# Altium footprint library Robert_.PcbLib: 95 footprints (part 5 of 6)
Each footprint in its own frame and in the unit in brackets; x right, y up, seen from the top. Pads: shape width x height; smd on the part's side, far side on the other; paste and mask are expansions set on the pad; w line width, h text height; cw(c..) or ccw(c..) is an arc to the next point about the centre after c.
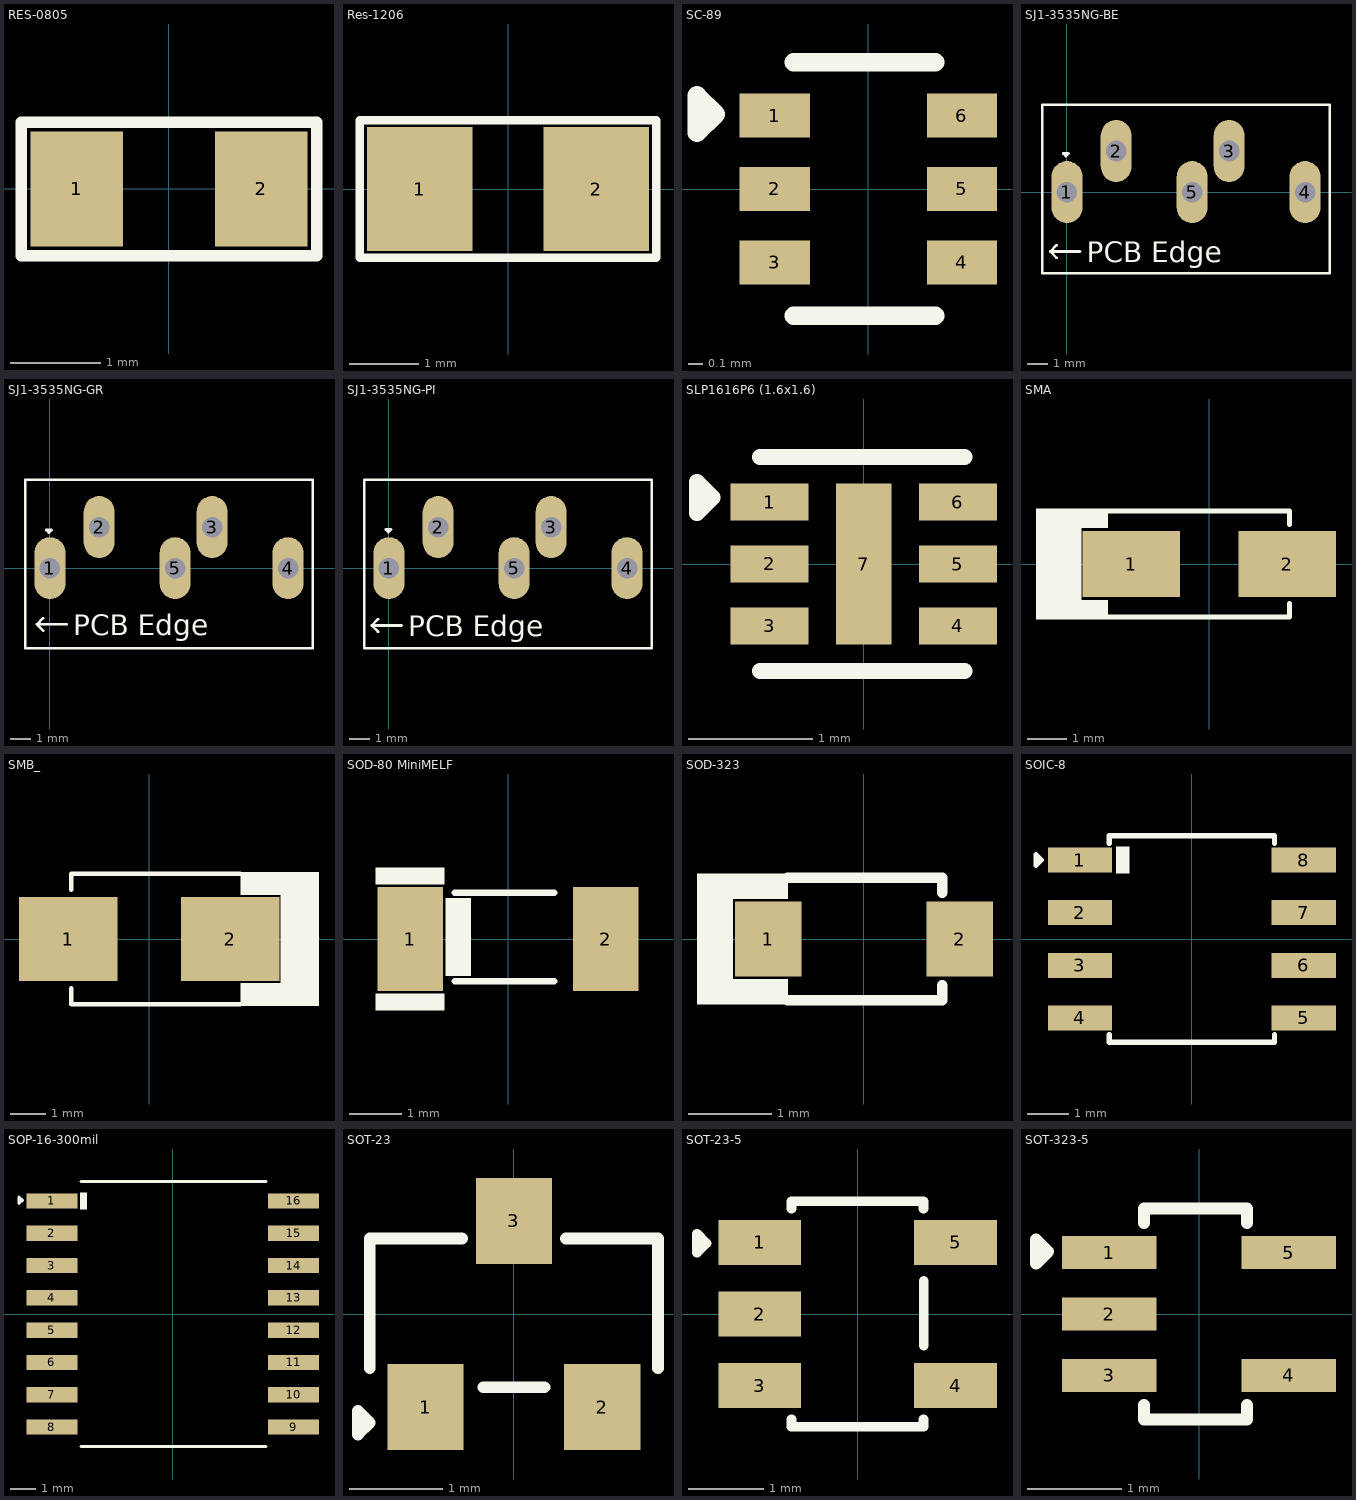
[diagram p4: the footprints below, top view; thin cyan lines are the x and y axes]

## RES-0805 [mil] "SMD 0805"
pads (2):
  rect 40x50 smd: 1(-40,0) 2(40,0)
Top Overlay:
  lines w5: -64,-29 -64,29 64,29 64,-29 -64,-29
3D body "User Library-CR2012-0805.STEP": height 23.62, standoff 0, extent -39.34,-24.75 39.4,24.46

## Res-1206 [mil]
pads (2):
  rect 60x70 smd: 1(-50,0) 2(50,0)
Top Overlay:
  lines w5: -84,-39 84,-39 84,39 -84,39 -84,-39
3D body "User Library-CR3216-1206.step": height 23.62, standoff 0, extent -62.99,-31.5 62.99,31.5

## SC-89 [mm]
pads (6):
  rect 0.478x0.3 smd: 1(-0.638,0.5) 2(-0.638,0) 3(-0.638,-0.5) 4(0.638,-0.5) 5(0.638,0) 6(0.638,0.5)
Top Overlay:
  lines w0.127: -0.508,-0.864 0.457,-0.864 ; -0.508,0.864 0.457,0.864 ; -1.168,0.383 -1.168,0.637 -1.041,0.51 -1.168,0.383
3D body "TMP112AIDRLR--3DModel-STEP-56544.STEP": height 0.6, standoff 0, extent -0.8,-0.8 0.8,0.8

## SJ1-3535NG-BE [mm]
pads (5):
  oval 1.508x3.016 hole 1 square: 1(0,0) 2(2.4,2) 3(7.9,2) 4(11.6,0) 5(6.1,0)
Top Overlay:
  lines w0.127: -0.508,-3.2 -0.813,-2.896 ; -0.508,-2.591 -0.813,-2.896 ; 0.635,-2.896 -0.813,-2.896 ; -1.2,-3.951 12.8,-3.951 12.8,4.249 -1.2,4.249 -1.2,-3.951 ; -0.178,1.88 -0.051,1.753 0.076,1.88 -0.178,1.88
  text "PCB Edge" at 0.954,-3.418 h1
3D body "step_temp.STEP": height 12.3, standoff -3.3, extent -5.2,-4 12.8,4.2

## SJ1-3535NG-GR [mm]
pads (5):
  oval 1.508x3.016 hole 1 square: 1(0,0) 2(2.4,2) 3(7.9,2) 4(11.6,0) 5(6.1,0)
Top Overlay:
  lines w0.127: -0.33,-3.048 -0.635,-2.743 ; -0.33,-2.438 -0.635,-2.743 ; 0.813,-2.743 -0.635,-2.743 ; -1.2,-3.9 12.8,-3.9 12.8,4.3 -1.2,4.3 -1.2,-3.9 ; -0.178,1.854 0.076,1.854 -0.051,1.727 -0.178,1.854
  text "PCB Edge" at 1.132,-3.265 h1
3D body "CUI_DEVICES_SJ1-3535NG-GR.step": height 12.3, standoff -3.3, extent -5.274,-3.937 12.776,4.263

## SJ1-3535NG-PI [mm]
pads (5):
  oval 1.508x3.016 hole 1 square: 1(0,0) 2(2.4,2) 3(7.9,2) 4(11.6,0) 5(6.1,0)
Top Overlay:
  lines w0.127: -0.533,-3.099 -0.838,-2.794 ; -0.533,-2.489 -0.838,-2.794 ; 0.61,-2.794 -0.838,-2.794 ; -1.2,-3.9 12.8,-3.9 12.8,4.3 -1.2,4.3 -1.2,-3.9 ; -0.152,1.88 -0.025,1.753 0.102,1.88 -0.152,1.88
  text "PCB Edge" at 0.928,-3.316 h1
3D body "CUI_DEVICES_SJ1-3535NG-PI.step": height 12.3, standoff -3.3, extent -5.299,-3.948 12.751,4.252

## SLP1616P6 (1.6x1.6) [mm]
pads (7):
  rect 0.63x0.3 smd: 1(-0.76,0.5) 2(-0.76,0) 3(-0.76,-0.5) 4(0.76,-0.5) 5(0.76,0) 6(0.76,0.5)
  rect 0.45x1.3 smd: 7(0,0)
Top Overlay:
  lines w0.127: -0.838,-0.864 0.813,-0.864 ; -0.838,0.864 0.813,0.864 ; -1.346,0.409 -1.219,0.536 -1.346,0.663 -1.346,0.409
3D body "RCLAMP3304P.TCT.stp": height 0.65, standoff 0, extent -0.85,-0.8 0.85,0.8

## SMA [mm]
pads (2):
  rect 2.5x1.7 smd: 1(-2,0) 2(2,0)
Top Overlay:
  rectangle: -3.3,0.924 -2.596,1.422
  rectangle: -4.445,-1.422 -3.278,1.422
  rectangle: -3.3,-1.422 -2.596,-0.924
  lines w0.127: -2.658,-1.358 2.061,-1.358 2.061,-1.012 ; -2.658,1.358 2.061,1.358 2.061,1.012
3D body "User Library-DO-214AC SMA.step": height 2.4, standoff 0, extent -2.6,-1.3 2.6,1.3

## SMB_ [mm]
pads (2):
  rect 2.8x2.4 smd: 1(-2.3,0) 2(2.3,0)
Top Overlay:
  rectangle: 2.591,1.245 4.826,1.905
  rectangle: 3.734,-1.651 4.826,1.346
  rectangle: 2.591,-1.905 4.826,-1.245
  lines w0.127: -2.21,-1.397 -2.21,-1.854 2.591,-1.854 ; -2.21,1.397 -2.21,1.854 2.591,1.854
3D body "User Library-DO-214AA SMB.step": height 2.3, standoff 0, extent -2.7,-1.8 2.7,1.8

## SOD-80 MiniMELF [mm]
pads (2):
  rect 1.25x2 smd mask+0.055: 1(-1.875,0) 2(1.875,0)
Top Overlay:
  rectangle: -1.194,-0.711 -0.711,0.787
  rectangle: -2.54,-1.372 -1.219,-1.041
  rectangle: -2.54,1.041 -1.219,1.372
  lines w0.127: -1.016,-0.813 0.889,-0.813 ; -1.016,0.889 0.889,0.889
3D body "LL4148-GS08.STEP": height 1.54, standoff -0.04, extent -1.75,-0.762 1.75,0.833

## SOD-323 [mm]
pads (2):
  rect 0.8x0.9 smd mask+0.055: 1(-1.15,0) 2(1.15,0)
Top Overlay:
  rectangle: -2.007,0.483 -0.914,0.787
  rectangle: -2.007,-0.787 -0.914,-0.483
  rectangle: -2.007,-0.508 -1.575,0.508
  lines w0.127: -0.914,-0.737 0.94,-0.737 0.94,-0.559 ; -0.914,0.737 0.94,0.737 0.94,0.559
3D body "User Library-SOD323-1.step": height 1.1, standoff 0, extent -1.3,-0.675 1.3,0.675

## SOIC-8 [mm]
pads (8):
  rect 1.55x0.6 smd: 1(-2.7,1.905) 2(-2.7,0.635) 3(-2.7,-0.635) 4(-2.7,-1.905) 5(2.7,-1.905) 6(2.7,-0.635) 7(2.7,0.635) 8(2.7,1.905)
Top Overlay:
  rectangle: -1.829,1.575 -1.499,2.235
  lines w0.127: -1.991,-2.311 -1.991,-2.489 1.991,-2.489 1.991,-2.311 ; -1.991,2.311 -1.991,2.489 1.991,2.489 1.991,2.311 ; -3.759,1.778 -3.632,1.905 -3.759,2.032 -3.759,1.778
3D body "User Library-SOIC-8-1.STEP": height 1.7, standoff -0.05, extent -3,-2.45 3,2.45

## SOP-16-300mil [mm]
pads (16):
  rect 2x0.6 smd: 1(-4.75,4.445) 2(-4.75,3.175) 3(-4.75,1.905) 4(-4.75,0.635) 5(-4.75,-0.635) 6(-4.75,-1.905) 7(-4.75,-3.175) 8(-4.75,-4.445) 9(4.75,-4.445) 10(4.75,-3.175) 11(4.75,-1.905) 12(4.75,-0.635) 13(4.75,0.635) 14(4.75,1.905) 15(4.75,3.175) 16(4.75,4.445)
Top Overlay:
  rectangle: -3.653,4.115 -3.373,4.775
  lines w0.127: -3.607,-5.207 3.658,-5.207 ; -3.607,5.207 3.658,5.207 ; -6.045,4.343 -6.045,4.597 -5.918,4.47 -6.045,4.343
3D body "DW0016B.stp": height 2.59, standoff 0, extent -5.167,-5.15 5.167,5.15

## SOT-23 [mm] "TRANS NPN 40V 0.6A SOT23"
pads (3):
  rect 0.82x0.92 smd: 1(-0.95,-1) 2(0.95,-1) 3(0,1)
Top Overlay:
  lines w0.127: -1.549,-0.584 -1.549,0.813 -0.559,0.813 ; -0.33,-0.787 0.33,-0.787 ; 0.559,0.813 1.549,0.813 1.549,-0.584 ; -1.676,-1.295 -1.676,-1.041 -1.549,-1.168 -1.676,-1.295
3D body "CircuitWorks-SOT-23.step": height 1.05, standoff -0.05, extent -1.5,-1.25 1.5,1.25

## SOT-23-5 [mm]
pads (5):
  rect 1.1x0.6 smd: 1(-1.3,0.95) 2(-1.3,0) 3(-1.3,-0.95) 4(1.3,-0.95) 5(1.3,0.95)
Top Overlay:
  lines w0.127: -0.879,-1.399 -0.879,-1.499 0.874,-1.499 0.874,-1.399 ; -0.879,1.399 -0.879,1.499 0.874,1.499 0.874,1.399 ; 0.88,-0.418 0.88,0.44 ; -2.134,0.813 -2.007,0.94 -2.134,1.067 -2.134,0.813
3D body "SN74LV1T34DBVR.STEP": height 1.45, standoff 0, extent -1.4,-1.45 1.4,1.45

## SOT-323-5 [mm]
pads (5):
  rect 1x0.35 smd: 1(-0.95,0.65) 2(-0.95,0) 3(-0.95,-0.65) 4(0.95,-0.65) 5(0.95,0.65)
Top Overlay:
  lines w0.127: -0.584,-0.965 -0.584,-1.118 0.508,-1.118 0.508,-0.965 ; -0.584,0.965 -0.584,1.118 0.508,1.118 0.508,0.965 ; -1.727,0.533 -1.6,0.66 -1.727,0.787 -1.727,0.533
3D body "User Library-SOT-323-5L.step": height 1, standoff 0, extent -1.051,-1.05 1.051,1.05